# Altium integrated library STM8L152M8T6.IntLib: 1 symbol
Pins are listed as number, name and electrical type; pins without a type are passive.

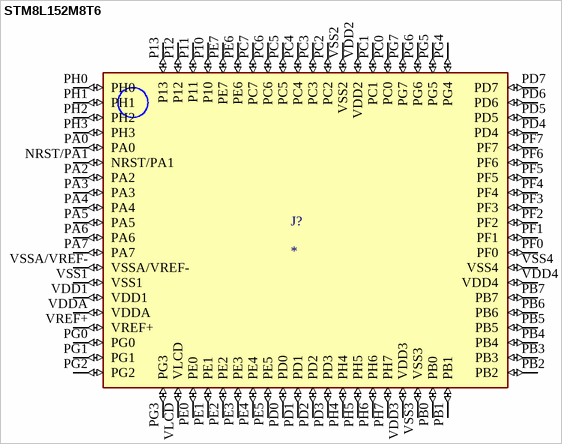
[diagram p0: symbol STM8L152M8T6]

## STM8L152M8T6
designator J?
8-bit ultralow power MCU, up to 64 KB Flash + 2KB data EEPROM, RTC, LCD, timers, USARTs, I2C, SPIs, ADC, DAC, comparators; MP: STM8L152M8T6; Price: None; Value: *; Availability: Unavailable; Package: None
footprint QFP-80(LQFP-80)
pins: NRST/PA1 (io), P10 (io), P11 (io), P12 (io), P13 (io), PA0 (io), PA2 (io), PA3 (io), PA4 (io), PA5 (io), PA6 (io), PA7 (io), PB0 (io), PB1 (io), PB2 (io), PB3 (io), PB4 (io), PB5 (io), PB6 (io), PB7 (io), PC0 (io), PC1 (io), PC2 (io), PC3 (io), PC4 (io), PC5 (io), PC6 (io), PC7 (io), PD0 (io), PD1 (io), PD2 (io), PD3 (io), PD4 (io), PD5 (io), PD6 (io), PD7 (io), PE0 (io), PE1 (io), PE2 (io), PE3 (io), PE4 (io), PE5 (io), PE6 (io), PE7 (io), PF0 (io), PF1 (io), PF2 (io), PF3 (io), PF4 (io), PF5 (io), PF6 (io), PF7 (io), PG0 (io), PG1 (io), PG2 (io), PG3 (io), PG4 (io), PG5 (io), PG6 (io), PG7 (io), PH0 (io), PH1 (io), PH2 (io), PH3 (io), PH4 (io), PH5 (io), PH6 (io), PH7 (io), VDD1 (io), VDD2 (io), VDD3 (io), VDD4 (io), VDDA (io), VLCD (io), VREF+ (io), VSS1 (io), VSS2 (io), VSS3 (io), VSS4 (io), VSSA/VREF- (io)